# Altium schematic symbol library 22k resistor 0805.SchLib: 1 symbol
Pins are listed as number, name and electrical type; pins without a type are passive.

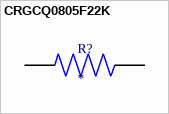
[diagram p0: symbol CRGCQ0805F22K]

## CRGCQ0805F22K
designator R?
Fixed Resistor CRGCQ 0805 22K 1%; MF: TE Connectivity; MP: CRGCQ0805F22K; SnapEDA_Link: https://www.snapeda.com/parts/CRGCQ0805F22K/TE+Connectivity/view-part/?ref=snap; Package: 2012 TE Connectivity; Value: *; Check_prices: https://www.snapeda.com/parts/CRGCQ0805F22K/TE+Connectivity/view-part/?ref=eda
footprint RESC2012X65N
pins: 1, 2